# Altium integrated library ICs.IntLib: 16 symbols
Pins are listed as number, name and electrical type; pins without a type are passive.

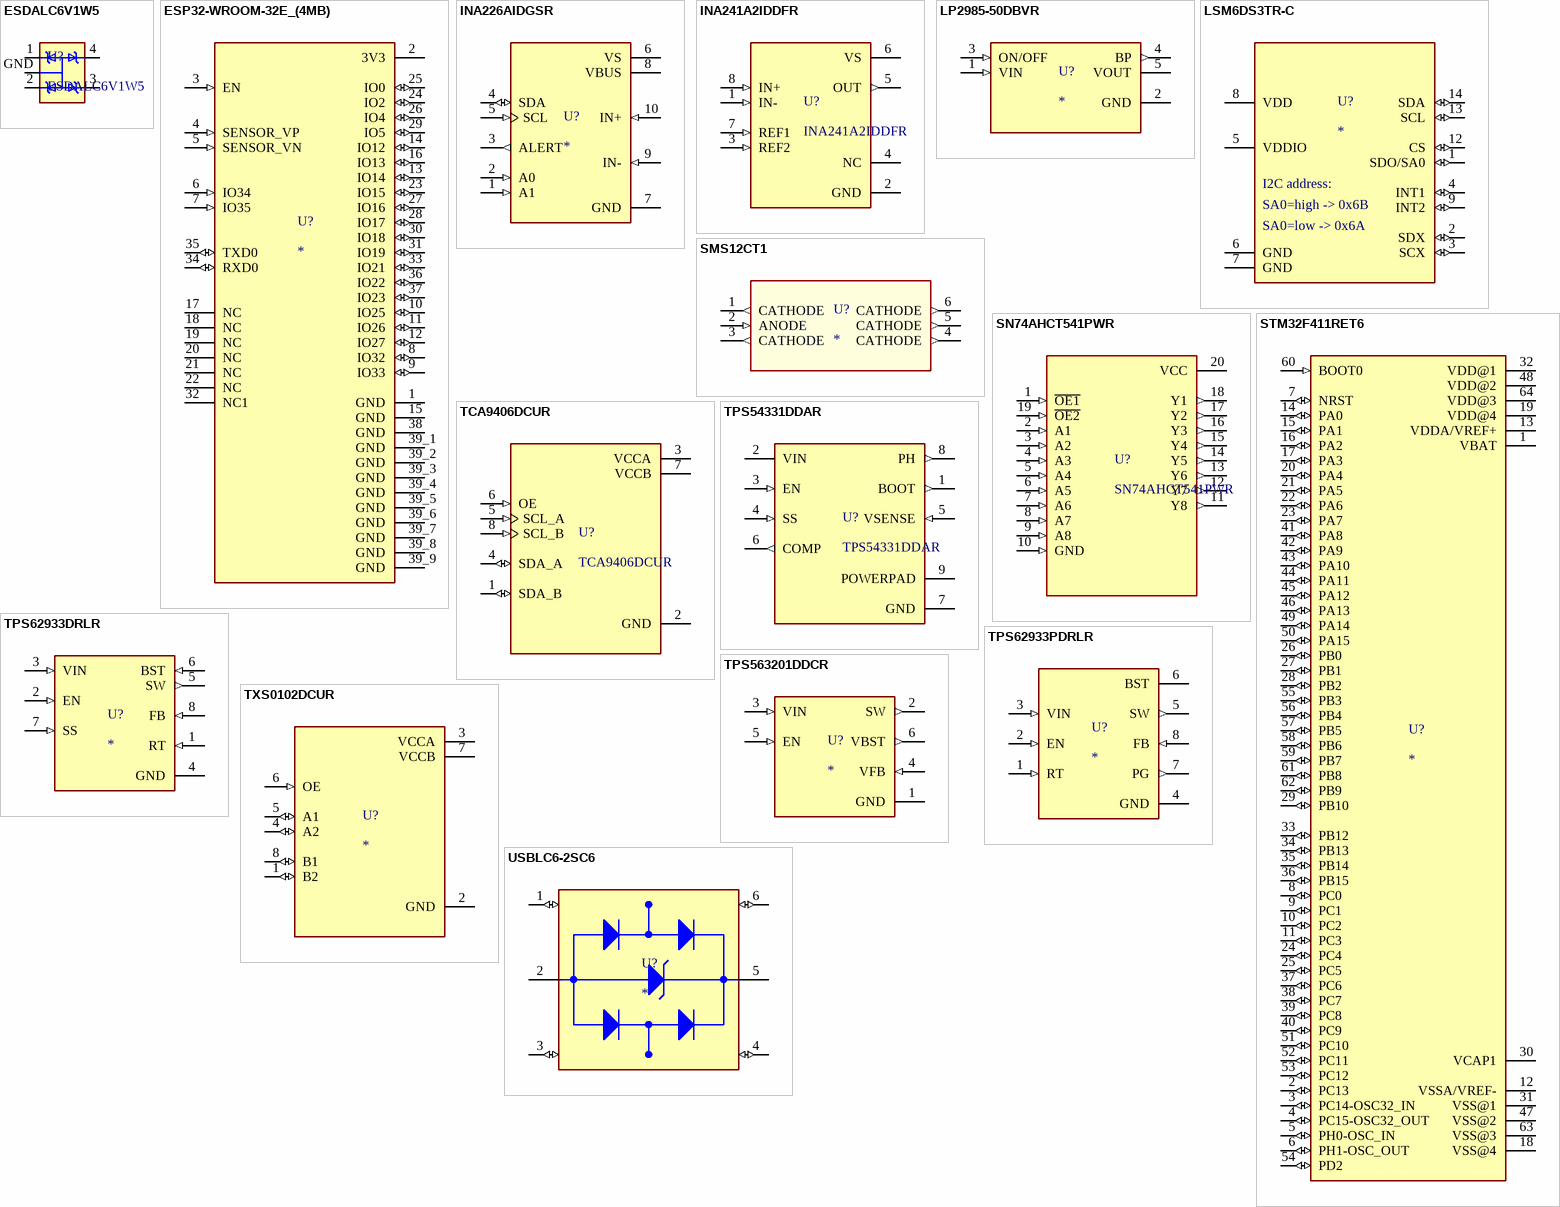
[diagram p0: symbols ESDALC6V1W5 to USBLC6-2SC6]

## ESDALC6V1W5
designator U?
Clamp Ipp Tvs Diode Surface Mount SOT-323-5; MF: STMicroelectronics; Package: SOT-323 STMicroelectronics; MPN: ESDALC6V1W5; LCSC Part Number: C703691
footprint SOT323-5L
pins: 1 I/01 (io), 2 I/02 (io), 3 I/03 (io), 4 I/04 (io), GND (power)

## ESP32-WROOM-32E_(4MB)
designator U?
Bluetooth, WiFi 802.11b/g/n, Bluetooth v4.2 +EDR, Class 1, 2 and 3 Transceiver Module 2.4GHz ~ 2.5GHz Integrated, Trace Surface Mount; MPN: ESP32-WROOM-32E (4MB); MF: Espressif Systems; Package: SMD-44 Espressif Systems
footprint XCVR_ESP32-WROOM-32E_(4MB)
pins: 1 GND (power), 2 3V3 (power), 3 EN (in), 4 SENSOR_VP (in), 5 SENSOR_VN (in), 6 IO34 (in), 7 IO35 (in), 8 IO32 (io), 9 IO33 (io), 10 IO25 (io), 11 IO26 (io), 12 IO27 (io), 13 IO14 (io), 14 IO12 (io), 15 GND (power), 16 IO13 (io), 17 NC, 18 NC, 19 NC, 20 NC, 21 NC, 22 NC, 23 IO15 (io), 24 IO2 (io), 25 IO0 (io), 26 IO4 (io), 27 IO16 (io), 28 IO17 (io), 29 IO5 (io), 30 IO18 (io), 31 IO19 (io), 32 NC1, 33 IO21 (io), 34 RXD0 (io), 35 TXD0 (io), 36 IO22 (io), 37 IO23 (io), 38 GND (power), 39_1 GND (power), 39_2 GND (power), 39_3 GND (power), 39_4 GND (power), 39_5 GND (power), 39_6 GND (power), 39_7 GND (power), 39_8 GND (power), 39_9 GND (power)

## INA226AIDGSR
designator U?
36V, 16-bit, ultra-precise i2c output current/voltage/power monitor w/alert; MPN: INA226AIDGSR; MF: Texas Instruments; Package: VSSOP-10 Texas Instruments; LCSC Part Number: C49851
footprint SOP50P490X110-10N
pins: 1 A1 (in), 2 A0 (in), 3 ALERT (out), 4 SDA (io), 5 SCL (in), 6 VS (power), 7 GND (power), 8 VBUS (power), 9 IN- (in), 10 IN+ (in)

## INA241A2IDDFR
designator U?
Ultra-Precise, Bidirectional, 80V Current Sense Amplifier, Gain=20V/V, SOT-23-8; MF: Texas Instruments; MPN: INA241A2IDDFR
footprint SOT65P280X110-8N
pins: 1 IN- (in), 2 GND (power), 3 REF2 (in), 4 NC, 5 OUT (out), 6 VS (power), 7 REF1 (in), 8 IN+ (in)

## LP2985-50DBVR
designator U?
150-mA, 16-V, low-dropout voltage regulator with enable; MPN: LP2985-50DBVR; MF: Texas Instruments; Package: SOT-23-5 Texas Instruments; LCSC Part Number: C74511
footprint SOT95P280X145-5N (SOT-23-5)
pins: 1 VIN (in), 2 GND (power), 3 ON/OFF (in), 4 BP (out), 5 VOUT (power)

## LSM6DS3TR-C
designator U?
IMUs - Inertial Measurement Units iNEMO 6DoF inertial module, for entry level / mid-tier smart phones and Portable PC platforms; MPN: LSM6DS3TR-C; MF: STMicroelectronics; LCSC Part Number: C967633
footprint LGA-14-2.5X3MM
pins: 1 SDO/SA0 (io), 2 SDX (io), 3 SCX (io), 4 INT1 (io), 5 VDDIO (power), 6 GND (power), 7 GND (power), 8 VDD (power), 9 INT2 (io), 12 CS (io), 13 SCL (io), 14 SDA (io)
text: I2C address:; SA0=high -> 0x6B; SA0=low -> 0x6A

## SMS12CT1
designator U?
23V Clamp 15A (8/20µs) Ipp Tvs Diode Surface Mount SC-74; MPN: SMS12CT1; MP: onsemi
footprint SOT95P275X110-6N
pins: 1 CATHODE (out), 2 ANODE (in), 3 CATHODE (out), 4 CATHODE (out), 5 CATHODE (out), 6 CATHODE (out)

## SN74AHCT541PWR
designator U?
Octal Buffers/Drivers With 3-State Outputs 20-TSSOP -40 to 125; MF: Texas Instruments; DigiKey Part Number: 296-1120-1-ND; Package: TSSOP-20 Texas Instruments; MPN: SN74AHCT541PWR; LCSC Part Number: C50989
footprint SOP65P640X120-20N
pins: 1 ~{OE1} (in), 2 A1 (in), 3 A2 (in), 4 A3 (in), 5 A4 (in), 6 A5 (in), 7 A6 (in), 8 A7 (in), 9 A8 (in), 10 GND (in), 11 Y8 (out), 12 Y7 (out), 13 Y6 (out), 14 Y5 (out), 15 Y4 (out), 16 Y3 (out), 17 Y2 (out), 18 Y1 (out), 19 ~{OE2} (in), 20 VCC (power)

## STM32F411RET6
designator U?
ARM Cortex-M4 STM32F4 Microcontroller IC 32-Bit 100MHz 512KB (512K x 8) FLASH 64-LQFP (10x10); MPN: STM32F411RET6; MF: STMicroelectronics; Package: LQFP-64 STMicroelectronics; LCSC Part Number: C94355
footprint QFP50P1200X1200X160-64N
pins: 1 VBAT (power), 2 PC13 (io), 3 PC14-OSC32_IN (io), 4 PC15-OSC32_OUT (io), 5 PH0-OSC_IN (io), 6 PH1-OSC_OUT (io), 7 NRST (io), 8 PC0 (io), 9 PC1 (io), 10 PC2 (io), 11 PC3 (io), 12 VSSA/VREF- (power), 13 VDDA/VREF+ (power), 14 PA0 (io), 15 PA1 (io), 16 PA2 (io), 17 PA3 (io), 18 VSS@4 (power), 19 VDD@4 (power), 20 PA4 (io), 21 PA5 (io), 22 PA6 (io), 23 PA7 (io), 24 PC4 (io), 25 PC5 (io), 26 PB0 (io), 27 PB1 (io), 28 PB2 (io), 29 PB10 (io), 30 VCAP1, 31 VSS@1 (power), 32 VDD@1 (power), 33 PB12 (io), 34 PB13 (io), 35 PB14 (io), 36 PB15 (io), 37 PC6 (io), 38 PC7 (io), 39 PC8 (io), 40 PC9 (io), 41 PA8 (io), 42 PA9 (io), 43 PA10 (io), 44 PA11 (io), 45 PA12 (io), 46 PA13 (io), 47 VSS@2 (power), 48 VDD@2 (power), 49 PA14 (io), 50 PA15 (io), 51 PC10 (io), 52 PC11 (io), 53 PC12 (io), 54 PD2 (io), 55 PB3 (io), 56 PB4 (io), 57 PB5 (io), 58 PB6 (io), 59 PB7 (io), 60 BOOT0 (in), 61 PB8 (io), 62 PB9 (io), 63 VSS@3 (power), 64 VDD@3 (power)

## TCA9406DCUR
designator U?
2-bit bidirectional 1MHz I2C/SMBus voltage level translator with internal pull-up resistor; MF: Texas Instruments; LCSC Part Number: C840107; MPN: TCA9406DCUR; Package: VSSOP-8 Texas Instruments
footprint SOP50P310X90-8N
pins: 1 SDA_B (io), 2 GND (power), 3 VCCA (power), 4 SDA_A (io), 5 SCL_A (in), 6 OE (in), 7 VCCB (power), 8 SCL_B (in)

## TPS54331DDAR
designator U?
3.5V to 28V Input, 3A Step-Down DC-DC Buck Converter with Eco-mode, SO PowerPAD-8; MF: Texas Instruments; MPN: TPS54331DDAR
footprint CONV_TPS54331DDAR
pins: 1 BOOT (out), 2 VIN (power), 3 EN (in), 4 SS (in), 5 VSENSE (in), 6 COMP (out), 7 GND (power), 8 PH (out), 9 POWERPAD (power)

## TPS62933DRLR
designator U?
3.8-V to 30-V, 3-A, 200-kHz to 2.2-MHz, low-IQ synchronous buck converter in SOT-583 package; MPN: TPS62933DRLR; MF: Texas Instruments; LCSC Part Number: C3200405; Package: SOT-583 Texas Instruments
footprint SOTFL50P160X60-8N
pins: 1 RT (in), 2 EN (in), 3 VIN (in), 4 GND (power), 5 SW (out), 6 BST (in), 7 SS (in), 8 FB (in)

## TPS62933PDRLR
designator U?
3.8-V to 30-V, 3-A, 200-kHz to 2.2-MHz, low-IQ synchronous buck converter in SOT-583 package; MPN: TPS62933PDRLR; MF: Texas Instruments; Package: SOT-583 Texas Instruments; LCSC Part Number: C5219254
footprint SOTFL50P160X60-8N
pins: 1 RT (in), 2 EN (in), 3 VIN (in), 4 GND (power), 5 SW (out), 6 BST (power), 7 PG (out), 8 FB (in)

## TPS563201DDCR
designator U?
4.5 V to 17 V input, 3 A output, synchronous step-down converter in Eco-mode; MPN: TPS563201DDCR; MF: Texas Instruments; Package: SOT-23-THN-6 Texas Instruments
footprint SOT95P280X110-6N
pins: 1 GND (power), 2 SW (out), 3 VIN (in), 4 VFB (in), 5 EN (in), 6 VBST (out)

## TXS0102DCUR
designator U?
2-Bit Bidirectional Voltage-Level Shifter for Open-Drain and Push-Pull Application; MPN: TXS0102DCUR; MF: Texas Instruments; Package: VSSOP-8 Texas Instruments
footprint SOP50P310X90-8N
pins: 1 B2 (io), 2 GND (power), 3 VCCA (power), 4 A2 (io), 5 A1 (io), 6 OE (in), 7 VCCB (power), 8 B1 (io)

## USBLC6-2SC6
designator U?
17V Clamp 5A (8/20Âµs) Ipp Tvs Diode Surface Mount SOT-23-6; MPN: USBLC6-2SC6; MF: STMicroelectronics; Package: SOT-23-6 STMicroelectronics; LCSC Part Number: C7519
footprint SOT95P280X145-6N
pins: 1 I/O1_IN (io), 2 GND (power), 3 I/O2_IN (io), 4 I/O2_OUT (io), 5 VBUS (power), 6 I/O1_OUT (io)